# EAGLE library part LSM6DSO (library LSM6DSO)
IMUs - Inertial Measurement Units iNEMO inertial module: 3D accelerometer and 3D gyroscope Source: Datasheet <https://www.st.com/en/mems-and-sensors/lsm6dso.html>
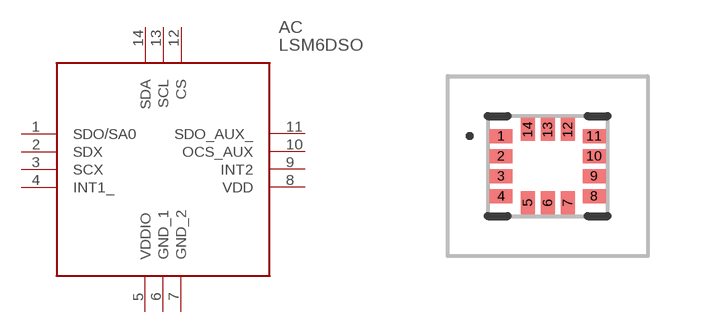
[diagram p0: symbol with the pads of LSM6DSO; footprint LSM6DSO]

Designator prefix AC

## LSM6DSO (Description: IMUs - Inertial Measurement Units iNEMO inertial module: 3D accelerometer and 3D gyroscope; Height: 0.86mm; Manufacturer_Name: STMicroelectronics; Manufacturer_Part_Number: LSM6DSO; Mouser_Part_Number: N/A; Mouser_Price-Stock: https://www.mouser.co.uk/ProductDetail/STMicroelectronics/LSM6DSO?qs=lc2O%252BfHJPVaWmEJZZeO%252B0w%3D%3D)  [LSM6DSO]
1  SDO/SA0
2  SDX
3  SCX
4  INT1_
5  VDDIO
6  GND_1
7  GND_2
8  VDD
9  INT2
10  OCS_AUX
11  SDO_AUX_
12  CS
13  SCL
14  SDA

## Footprint LSM6DSO (pad centres in mm)
LSM6DSO-1
smd 0.575 x 0.35: 1 -1.163,0.75; 2 -1.163,0.25; 3 -1.163,-0.25; 4 -1.163,-0.75; 8 1.163,-0.75; 9 1.163,-0.25; 10 1.163,0.25; 11 1.163,0.75
smd 0.35 x 0.575: 5 -0.5,-0.913; 6 0,-0.913; 7 0.5,-0.913; 12 0.5,0.913; 13 0,0.913; 14 -0.5,0.913